# Altium schematic symbol library WE-RJ45_7499010121A.SchLib: 1 symbol
Pins are listed as number, name and electrical type; pins without a type are passive.

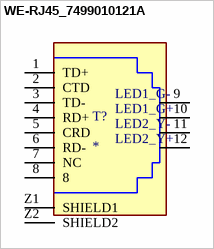
[diagram p0: symbol WE-RJ45_7499010121A]

## WE-RJ45_7499010121A
designator T?
MF: {'manufacturer': u'Wurth Electronics'}; MP: 7499010121A; Package: None; Price: None; Value: *; Availability: Unavailable
footprint 7499010121A
pins: 1 TD+, 2 CTD, 3 TD-, 4 RD+, 5 CRD, 6 RD-, 7 NC, 8, 9 LED1_G-, 10 LED1_G+, 11 LED2_Y-, 12 LED2_Y+, Z1 SHIELD1, Z2 SHIELD2